# Altium footprint library SamacSys.PcbLib: 1008 footprints (part 49 of 63)
Each footprint in its own frame and in the unit in brackets; x right, y up, seen from the top. Pads: shape width x height; smd on the part's side, far side on the other; paste and mask are expansions set on the pad; w line width, h text height; cw(c..) or ccw(c..) is an arc to the next point about the centre after c.
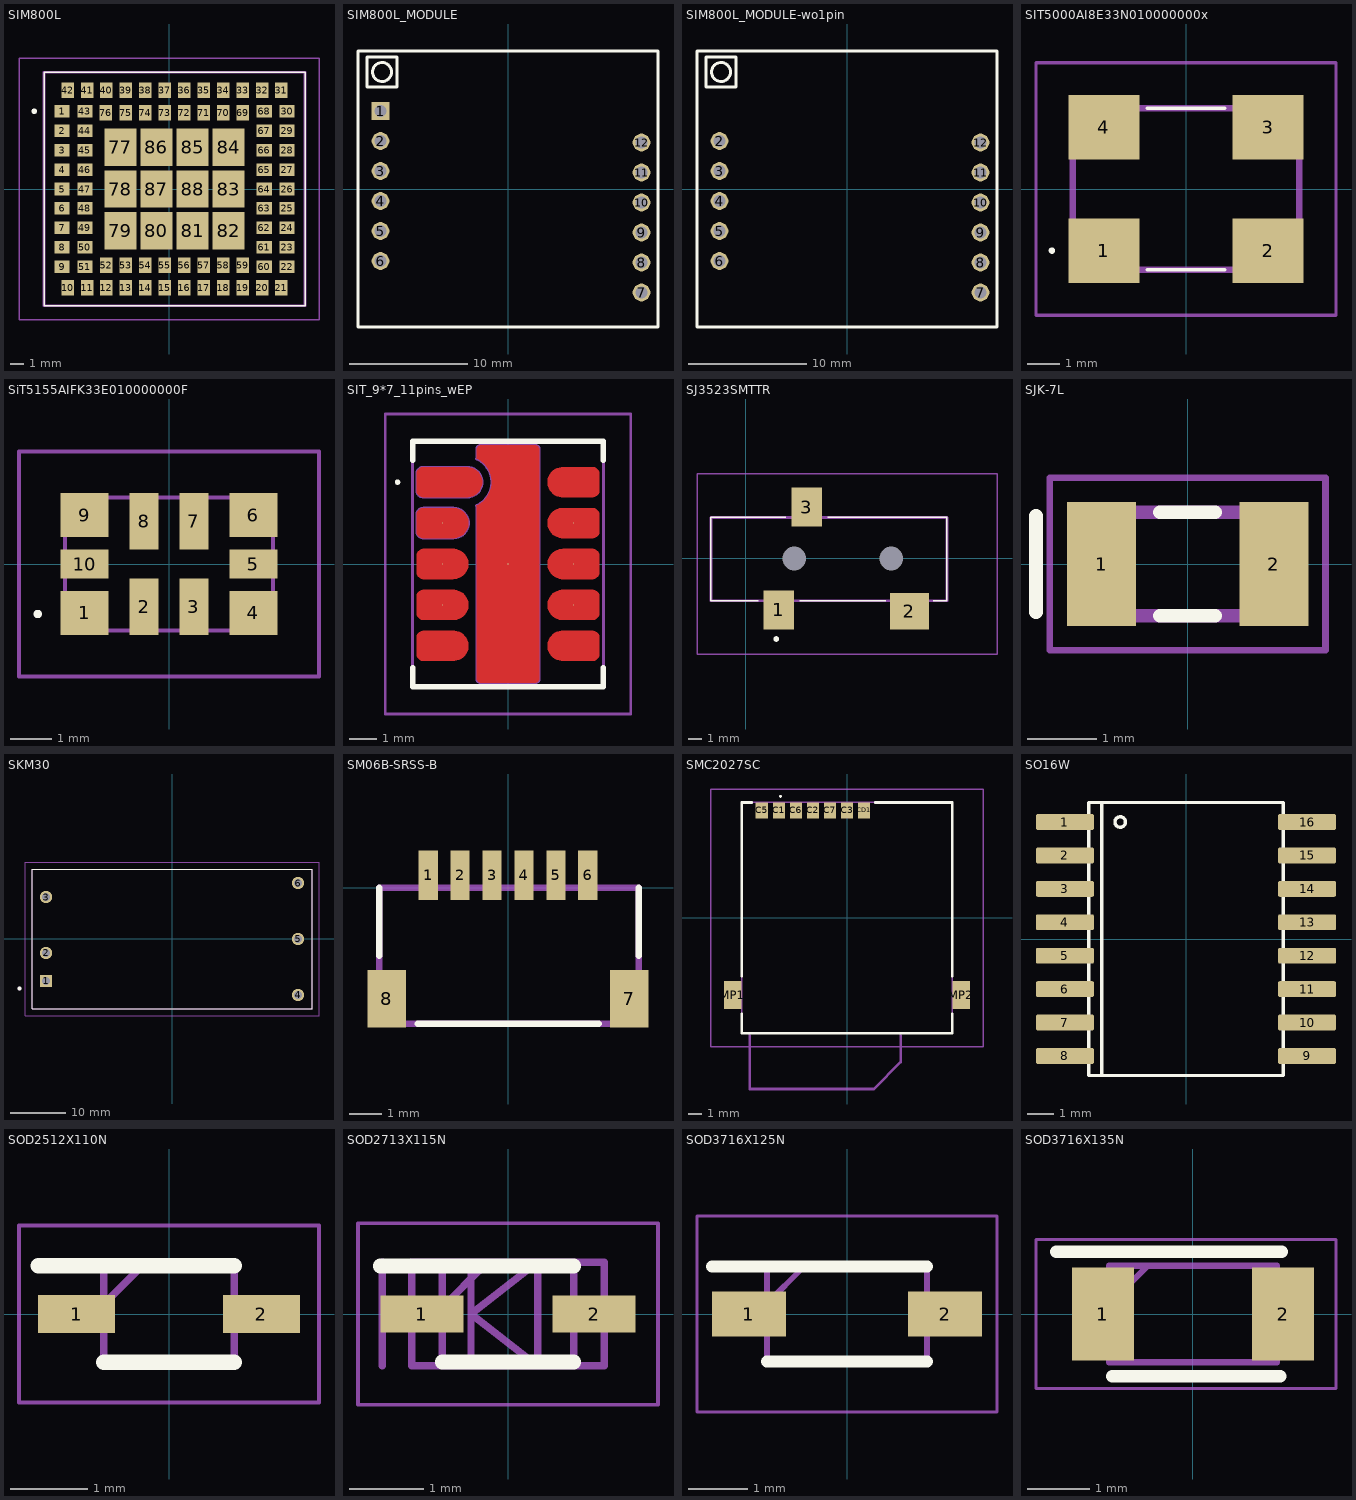
[diagram p48: the footprints below, top view; thin cyan lines are the x and y axes]

## SIM800L [mm]
pads (88):
  rect 1.1x0.9 smd: 1(-7.7,5.6) 2(-7.7,4.2) 3(-7.7,2.8) 4(-7.7,1.4) 5(-7.7,0) 6(-7.7,-1.4) 7(-7.7,-2.8) 8(-7.7,-4.2) 9(-7.7,-5.6) 22(8.5,-5.6) 23(8.5,-4.2) 24(8.5,-2.8) 25(8.5,-1.4) 26(8.5,0) 27(8.5,1.4) 28(8.5,2.8) 29(8.5,4.2) 30(8.5,5.6) 43(-6.05,5.6) 44(-6.05,4.2) 45(-6.05,2.8) 46(-6.05,1.4) 47(-6.05,0) 48(-6.05,-1.4) 49(-6.05,-2.8) 50(-6.05,-4.2) 51(-6.05,-5.6) 60(6.85,-5.6) 61(6.85,-4.2) 62(6.85,-2.8) 63(6.85,-1.4) 64(6.85,0) 65(6.85,1.4) 66(6.85,2.8) 67(6.85,4.2) 68(6.85,5.6)
  rect 0.9x1.1 smd: 10(-7.3,-7.1) 11(-5.9,-7.1) 12(-4.5,-7.1) 13(-3.1,-7.1) 14(-1.7,-7.1) 15(-0.3,-7.1) 16(1.1,-7.1) 17(2.5,-7.1) 18(3.9,-7.1) 19(5.3,-7.1) 20(6.7,-7.1) 21(8.1,-7.1) 31(8.1,7.1) 32(6.7,7.1) 33(5.3,7.1) 34(3.9,7.1) 35(2.5,7.1) 36(1.1,7.1) 37(-0.3,7.1) 38(-1.7,7.1) 39(-3.1,7.1) 40(-4.5,7.1) 41(-5.9,7.1) 42(-7.3,7.1) 52(-4.5,-5.5) 53(-3.1,-5.5) 54(-1.7,-5.5) 55(-0.3,-5.5) 56(1.1,-5.5) 57(2.5,-5.5) 58(3.9,-5.5) 59(5.3,-5.5) 69(5.3,5.5) 70(3.9,5.5) 71(2.5,5.5) 72(1.1,5.5) 73(-0.3,5.5) 74(-1.7,5.5) 75(-3.1,5.5) 76(-4.55,5.5)
  rect 2.3x2.7 smd: 77(-3.5,3) 78(-3.5,0) 79(-3.5,-3) 80(-0.9,-3) 81(1.7,-3) 82(4.3,-3) 83(4.3,0) 84(4.3,3) 85(1.7,3) 86(-0.9,3) 87(-0.9,0) 88(1.7,0)
Top Overlay:
  lines w0.1: -9,-8.4 9.8,-8.4 9.8,8.4 -9,8.4 -9,-8.4
  lines w0.2: -9.7,5.5 cw(c-9.7,5.6) -9.7,5.7 cw(c-9.7,5.6) -9.7,5.5
Assembly:
  lines w0.2: -9,-8.4 9.8,-8.4 9.8,8.4 -9,8.4 -9,-8.4
Countryard:
  lines w0.1: -10.8,-9.4 10.8,-9.4 10.8,9.4 -10.8,9.4 -10.8,-9.4
3D body "SIM800L.stp": height 2.42, standoff 0, extent -8.786,-7.896 9.014,7.904

## SIM800L_MODULE [mm]
height 10
pads (12):
  rect 1.5x1.5 hole 1: 1(-10.795,6.604)
  round 1.5 hole 1: 2(-10.795,4.064) 3(-10.795,1.524) 4(-10.795,-1.016) 5(-10.795,-3.556) 6(-10.795,-6.096) 7(11.303,-8.763) 8(11.303,-6.223) 9(11.303,-3.683) 10(11.303,-1.143) 11(11.303,1.397) 12(11.303,3.937)
Top Overlay:
  circle w0.254: c-10.668,9.906 r0.803
  lines w0.25: -12.7,-11.684 12.7,-11.684 12.7,11.684 -12.7,11.684 -12.7,-11.684
  lines w0.254: -11.938,8.636 -11.938,11.176 -9.398,11.176 -9.398,8.636 -11.938,8.636
Assembly:
  lines w0.1: -12.7,-11.684 12.7,-11.684 12.7,11.684 -12.7,11.684 -12.7,-11.684
Countryard:
  lines w0.1: -12.7,-11.684 -12.7,11.684 12.7,11.684 12.7,-11.684 -12.7,-11.684
3D body "User Library-PBS_(DS1023)_1line_connectors_h=5_0_8_5mm_step_2_54mm-1.step": height 5, standoff -3.3, extent -12.045,-7.616 -9.545,8.124
3D body "User Library-PBS_(DS1023)_1line_connectors_h=5_0_8_5mm_step_2_54mm-1.step": height 5, standoff -3.3, extent 10.053,-10.283 12.553,5.457
3D body "SIM800L v10.step": height 9.28, standoff 3.51, extent -12.5,-11.5 12.518,11.5

## SIM800L_MODULE-wo1pin [mm]
height 10
pads (11):
  round 1.5 hole 1: 2(-10.795,4.064) 3(-10.795,1.524) 4(-10.795,-1.016) 5(-10.795,-3.556) 6(-10.795,-6.096) 7(11.303,-8.763) 8(11.303,-6.223) 9(11.303,-3.683) 10(11.303,-1.143) 11(11.303,1.397) 12(11.303,3.937)
Top Overlay:
  circle w0.254: c-10.668,9.906 r0.803
  lines w0.25: -12.7,-11.684 -12.7,11.684 12.7,11.684 12.7,-11.684 -12.7,-11.684
  lines w0.254: -11.938,8.636 -9.398,8.636 -9.398,11.176 -11.938,11.176 -11.938,8.636
Assembly:
  lines w0.1: -12.7,-11.684 -12.7,11.684 12.7,11.684 12.7,-11.684 -12.7,-11.684
Countryard:
  lines w0.1: -12.7,-11.684 12.7,-11.684 12.7,11.684 -12.7,11.684 -12.7,-11.684
3D body "User Library-PBS_(DS1023)_1line_connectors_h=5_0_8_5mm_step_2_54mm (3).step": height 8.5, standoff -3, extent -12.05,-7.6 -9.55,5.6
3D body "SIM800L v10.step": height 9.28, standoff 3.51, extent -12.5,-11.5 12.518,11.5
3D body "User Library-PBS_(DS1023)_1line_connectors_h=5_0_8_5mm_step_2_54mm-1.step": height 5, standoff -3.3, extent 10.053,-10.283 12.553,5.457

## SIT5000AI8E33N010000000x [mm]
pads (4):
  rect 2.2x2 smd: 1(-2.54,-1.905) 2(2.54,-1.905) 3(2.54,1.905) 4(-2.54,1.905)
Top Overlay:
  lines w0.1: -1.2,-2.5 1.2,-2.5 ; -1.2,2.5 1,2.5 1.2,2.5 ; -4.2,-1.905 cw(c-4.15,-1.905) -4.1,-1.905 cw(c-4.15,-1.905) -4.2,-1.905
Assembly:
  lines w0.2: -3.5,-2.5 -3.5,2.5 3.5,2.5 3.5,-2.5 -3.5,-2.5
Countryard:
  lines w0.1: -4.64,-3.905 -4.64,3.905 4.64,3.905 4.64,-3.905 -4.64,-3.905
3D body "SIT5000AI-8E-33N0-10.000000x.stp": height 1.1, standoff 0, extent -3.5,-2.705 3.5,2.705

## SiT5155AIFK33E010000000F [mm]
pads (10):
  rect 1.15x1.05 smd: 1(-2.025,-1.175) 4(2.025,-1.175) 6(2.025,1.175) 9(-2.025,1.175)
  rect 0.7x1.35 smd: 2(-0.6,-1.025) 3(0.6,-1.025) 7(0.6,1.025) 8(-0.6,1.025)
  rect 1.15x0.7 smd: 5(2.025,0) 10(-2.025,0)
Top Overlay:
  lines w0.1: -3.2,-1.2 cw(c-3.15,-1.2) -3.1,-1.2 cw(c-3.15,-1.2) -3.2,-1.2
Assembly:
  lines w0.1: -2.5,-1.6 2.5,-1.6 2.5,1.6 -2.5,1.6 -2.5,-1.6
Countryard:
  lines w0.1: -3.6,-2.7 3.6,-2.7 3.6,2.7 -3.6,2.7 -3.6,-2.7
3D body "SiT5155AI-FK-33E0-10.000000F.stp": height 1.16, standoff 0, extent -2.53,-1.63 2.53,1.63

## SIT_9*7_11pins_wEP [mil]
pads (11):
  round 1 smd: 1(-84.65,118.11) 2(-94.49,59.06) 3(-94.49,0) 4(-94.49,-59.06) 5(-94.49,-118.11) 6(94.49,-118.11) 7(94.49,-59.06) 8(94.49,0) 9(94.49,59.06) 10(94.49,118.11) 11(-0.17,0)
Top Layer:
  region: 122.05,139.76 123.02,139.76 124.92,139.39 126.71,138.64 128.32,137.57 129.69,136.2 130.77,134.58 131.51,132.79 131.89,130.89 131.89,129.92 131.89,106.3 131.89,105.33 131.51,103.43 130.77,101.64 129.69,100.02 128.32,98.65 126.71,97.58 124.92,96.83 123.02,96.46 122.05,96.46 78.74,96.46 77.04,96.46 73.67,96.99 70.43,98.04 67.39,99.59 64.63,101.59 62.22,104 60.22,106.76 58.67,109.8 57.62,113.04 57.09,116.41 57.09,119.81 57.62,123.18 58.67,126.42 60.22,129.46 62.22,132.22 64.63,134.63 67.39,136.63 70.43,138.18 73.67,139.23 77.04,139.76 78.74,139.76
  region: 122.05,80.71 123.02,80.71 124.92,80.33 126.71,79.59 128.32,78.51 129.69,77.14 130.77,75.53 131.51,73.74 131.89,71.84 131.89,70.87 131.89,47.24 131.89,46.27 131.51,44.37 130.77,42.58 129.69,40.97 128.32,39.6 126.71,38.52 124.92,37.78 123.02,37.4 122.05,37.4 78.74,37.4 77.04,37.4 73.67,37.93 70.43,38.99 67.39,40.54 64.63,42.54 62.22,44.95 60.22,47.71 58.67,50.74 57.62,53.98 57.09,57.35 57.09,60.76 57.62,64.13 58.67,67.37 60.22,70.4 62.22,73.16 64.63,75.57 67.39,77.57 70.43,79.12 73.67,80.18 77.04,80.71 78.74,80.71
  region: 122.05,21.65 123.02,21.65 124.92,21.28 126.71,20.53 128.32,19.46 129.69,18.09 130.77,16.47 131.51,14.68 131.89,12.78 131.89,11.81 131.89,-11.81 131.89,-12.78 131.51,-14.68 130.77,-16.47 129.69,-18.09 128.32,-19.46 126.71,-20.53 124.92,-21.28 123.02,-21.65 122.05,-21.65 78.74,-21.65 77.04,-21.65 73.67,-21.12 70.43,-20.07 67.39,-18.52 64.63,-16.52 62.22,-14.11 60.22,-11.35 58.67,-8.31 57.62,-5.07 57.09,-1.7 57.09,1.7 57.62,5.07 58.67,8.31 60.22,11.35 62.22,14.11 64.63,16.52 67.39,18.52 70.43,20.07 73.67,21.12 77.04,21.65 78.74,21.65
  region: 122.05,-37.4 123.02,-37.4 124.92,-37.78 126.71,-38.52 128.32,-39.6 129.69,-40.97 130.77,-42.58 131.51,-44.37 131.89,-46.27 131.89,-47.24 131.89,-70.87 131.89,-71.84 131.51,-73.74 130.77,-75.53 129.69,-77.14 128.32,-78.51 126.71,-79.59 124.92,-80.33 123.02,-80.71 122.05,-80.71 78.74,-80.71 77.04,-80.71 73.67,-80.18 70.43,-79.12 67.39,-77.57 64.63,-75.57 62.22,-73.16 60.22,-70.4 58.67,-67.37 57.62,-64.13 57.09,-60.76 57.09,-57.35 57.62,-53.98 58.67,-50.74 60.22,-47.71 62.22,-44.95 64.63,-42.54 67.39,-40.54 70.43,-38.99 73.67,-37.93 77.04,-37.4 78.74,-37.4
  region: -122.05,-139.76 -123.02,-139.76 -124.92,-139.39 -126.71,-138.64 -128.32,-137.57 -129.69,-136.2 -130.77,-134.58 -131.51,-132.79 -131.89,-130.89 -131.89,-129.92 -131.89,-106.3 -131.89,-105.33 -131.51,-103.43 -130.77,-101.64 -129.69,-100.02 -128.32,-98.65 -126.71,-97.58 -124.92,-96.83 -123.02,-96.46 -122.05,-96.46 -78.74,-96.46 -77.04,-96.46 -73.67,-96.99 -70.43,-98.04 -67.39,-99.59 -64.63,-101.59 -62.22,-104 -60.22,-106.76 -58.67,-109.8 -57.62,-113.04 -57.09,-116.41 -57.09,-119.81 -57.62,-123.18 -58.67,-126.42 -60.22,-129.46 -62.22,-132.22 -64.63,-134.63 -67.39,-136.63 -70.43,-138.18 -73.67,-139.23 -77.04,-139.76 -78.74,-139.76
  region: -122.05,-80.71 -123.02,-80.71 -124.92,-80.33 -126.71,-79.59 -128.32,-78.51 -129.69,-77.14 -130.77,-75.53 -131.51,-73.74 -131.89,-71.84 -131.89,-70.87 -131.89,-47.24 -131.89,-46.27 -131.51,-44.37 -130.77,-42.58 -129.69,-40.97 -128.32,-39.6 -126.71,-38.52 -124.92,-37.78 -123.02,-37.4 -122.05,-37.4 -78.74,-37.4 -77.04,-37.4 -73.67,-37.93 -70.43,-38.99 -67.39,-40.54 -64.63,-42.54 -62.22,-44.95 -60.22,-47.71 -58.67,-50.74 -57.62,-53.98 -57.09,-57.35 -57.09,-60.76 -57.62,-64.13 -58.67,-67.37 -60.22,-70.4 -62.22,-73.16 -64.63,-75.57 -67.39,-77.57 -70.43,-79.12 -73.67,-80.18 -77.04,-80.71 -78.74,-80.71
  region: -122.05,-21.65 -123.02,-21.65 -124.92,-21.28 -126.71,-20.53 -128.32,-19.46 -129.69,-18.09 -130.77,-16.47 -131.51,-14.68 -131.89,-12.78 -131.89,-11.81 -131.89,11.81 -131.89,12.78 -131.51,14.68 -130.77,16.47 -129.69,18.09 -128.32,19.46 -126.71,20.53 -124.92,21.28 -123.02,21.65 -122.05,21.65 -78.74,21.65 -77.04,21.65 -73.67,21.12 -70.43,20.07 -67.39,18.52 -64.63,16.52 -62.22,14.11 -60.22,11.35 -58.67,8.31 -57.62,5.07 -57.09,1.7 -57.09,-1.7 -57.62,-5.07 -58.67,-8.31 -60.22,-11.35 -62.22,-14.11 -64.63,-16.52 -67.39,-18.52 -70.43,-20.07 -73.67,-21.12 -77.04,-21.65 -78.74,-21.65
  region: -122.05,96.46 -123.02,96.46 -124.92,96.83 -126.71,97.58 -128.32,98.65 -129.69,100.02 -130.77,101.64 -131.51,103.43 -131.89,105.33 -131.89,106.3 -131.89,129.92 -131.89,130.89 -131.51,132.79 -130.77,134.58 -129.69,136.2 -128.32,137.57 -126.71,138.64 -124.92,139.39 -123.02,139.76 -122.05,139.76 -59.06,139.76 -57.35,139.76 -53.98,139.23 -50.74,138.18 -47.71,136.63 -44.95,134.63 -42.54,132.22 -40.54,129.46 -38.99,126.42 -37.93,123.18 -37.4,119.81 -37.4,116.41 -37.93,113.04 -38.99,109.8 -40.54,106.76 -42.54,104 -44.95,101.59 -47.71,99.59 -50.74,98.04 -53.98,96.99 -57.35,96.46 -59.06,96.46
  region: -122.05,37.4 -123.02,37.4 -124.92,37.78 -126.71,38.52 -128.32,39.6 -129.69,40.97 -130.77,42.58 -131.51,44.37 -131.89,46.27 -131.89,47.24 -131.89,70.87 -131.89,71.84 -131.51,73.74 -130.77,75.53 -129.69,77.14 -128.32,78.51 -126.71,79.59 -124.92,80.33 -123.02,80.71 -122.05,80.71 -78.74,80.71 -77.04,80.71 -73.67,80.18 -70.43,79.12 -67.39,77.57 -64.63,75.57 -62.22,73.16 -60.22,70.4 -58.67,67.37 -57.62,64.13 -57.09,60.76 -57.09,57.35 -57.62,53.98 -58.67,50.74 -60.22,47.71 -62.22,44.95 -64.63,42.54 -67.39,40.54 -70.43,38.99 -73.67,37.93 -77.04,37.4 -78.74,37.4
  region: 122.05,-96.46 123.02,-96.46 124.92,-96.83 126.71,-97.58 128.32,-98.65 129.69,-100.02 130.77,-101.64 131.51,-103.43 131.89,-105.33 131.89,-106.3 131.89,-129.92 131.89,-130.89 131.51,-132.79 130.77,-134.58 129.69,-136.2 128.32,-137.57 126.71,-138.64 124.92,-139.39 123.02,-139.76 122.05,-139.76 78.74,-139.76 77.04,-139.76 73.67,-139.23 70.43,-138.18 67.39,-136.63 64.63,-134.63 62.22,-132.22 60.22,-129.46 58.67,-126.42 57.62,-123.18 57.09,-119.81 57.09,-116.41 57.62,-113.04 58.67,-109.8 60.22,-106.76 62.22,-104 64.63,-101.59 67.39,-99.59 70.43,-98.04 73.67,-96.99 77.04,-96.46 78.74,-96.46
  region: -45.28,-165.35 -45.28,84.65 -45.61,84.03 -43.21,85.22 -38.71,88.09 -34.67,91.57 -31.16,95.6 -28.25,100.08 -26.02,104.93 -24.5,110.05 -23.73,115.33 -23.71,120.67 -24.45,125.96 -25.94,131.08 -28.15,135.95 -31.02,140.45 -34.51,144.49 -38.54,148 -43.02,150.89 -45.41,152.1 -45.28,151.57 -45.28,165.35 -45.28,165.94 -45.05,167.08 -44.6,168.15 -43.96,169.12 -43.13,169.94 -42.17,170.59 -41.09,171.03 -39.95,171.26 -39.37,171.26 39.37,171.26 39.95,171.26 41.09,171.03 42.17,170.59 43.13,169.94 43.96,169.12 44.6,168.15 45.05,167.08 45.28,165.94 45.28,165.35 45.28,-165.35 45.28,-165.94 45.05,-167.08 44.6,-168.15 43.96,-169.12 43.13,-169.94 42.17,-170.59 41.09,-171.03 39.95,-171.26 39.37,-171.26 -39.37,-171.26 -39.95,-171.26 -41.09,-171.03 -42.17,-170.59 -43.13,-169.94 -43.96,-169.12 -44.6,-168.15 -45.05,-167.08 -45.28,-165.94
Top Overlay:
  lines w3.94: -161.42,118.11 ccw(c-159.45,118.11) -157.48,118.11 ccw(c-159.45,118.11) -161.42,118.11
  lines w7.87: -137.8,-149.61 -137.8,-177.17 137.8,-177.17 137.8,-149.61 ; -137.8,149.61 -137.8,177.17 137.8,177.17 137.8,149.61
Assembly:
  lines w3.94: -137.8,-177.17 -137.8,177.17 137.8,177.17 137.8,-177.17 -137.8,-177.17
Countryard:
  lines w3.94: -45.61,84.03 ccw(c-61.02,118.11) -45.41,152.1 ; -45.28,84.65 -45.28,-165.35 ccw(c-39.37,-165.35) -39.37,-171.26 39.37,-171.26 ccw(c39.37,-165.35) 45.28,-165.35 45.28,165.35 ccw(c39.37,165.35) 39.37,171.26 -39.37,171.26 ccw(c-39.37,165.35) -45.28,165.35 -45.28,151.57 ; -177.17,-216.54 -177.17,216.54 177.17,216.54 177.17,-216.54 -177.17,-216.54 ; -131.89,47.24 ccw(c-122.05,47.24) -122.05,37.4 -78.74,37.4 ccw(c-78.74,59.06) -78.74,80.71 -122.05,80.71 ccw(c-122.05,70.87) -131.89,70.87 -131.89,47.24 ; -131.89,106.3 ccw(c-122.05,106.3) -122.05,96.46 -59.06,96.46 ccw(c-59.06,118.11) -59.06,139.76 -122.05,139.76 ccw(c-122.05,129.92) -131.89,129.92 -131.89,106.3
3D body: height 141.73, standoff 0, extent -137.8,-177.17 137.8,177.17

## SJ3523SMTTR [mm]
pads (5):
  rect 2.2x2.8 smd: 1(2.4,-3.7) 3(4.4,3.7)
  rect 2.8x2.6 smd: 2(11.8,-3.8)
  round 0.85 hole 1.7 unplated: MH1(3.5,0) MH2(10.5,0)
Top Overlay:
  lines w0.1: 0.9,-3.05 -2.5,-3.05 -2.5,2.95 2.9,2.95 ; 3.9,-3.05 10.1,-3.05 ; 5.9,2.95 14.5,2.95 ; 13.5,-3.05 14.5,-3.05 14.5,-1.5 14.5,3
  lines w0.2: 2.1,-5.8 cw(c2.2,-5.8) 2.3,-5.8 cw(c2.2,-5.8) 2.1,-5.8
Assembly:
  lines w0.2: -2.5,-3.05 -2.5,2.95 14.5,2.95 14.5,-3.05 -2.5,-3.05
Countryard:
  lines w0.1: -3.5,-6.9 -3.5,6.1 18.1,6.1 18.1,-6.9 -3.5,-6.9
3D body "SJ-3523-SMT-TR.stp": height 5.3, standoff -1.7, extent -2.5,-4.88 14.5,4.88

## SJK-7L [mm]
pads (2):
  rect 1x1.8 smd: 1(-1.25,0) 2(1.25,0)
Top Overlay:
  lines w0.2: -2.2,-0.7 -2.2,0.7 ; -0.4,-0.75 0.4,-0.75 ; -0.4,0.75 0.4,0.75
Assembly:
  lines w0.2: -1.6,-0.75 -1.6,0.75 1.6,0.75 1.6,-0.75 -1.6,-0.75
Countryard:
  lines w0.1: -2,-1.25 -2,1.25 2,1.25 2,-1.25 -2,-1.25
3D body "FC-135_32.7680KA-A0.stp": height 0.9, standoff 0, extent -1.6,-0.75 1.6,0.75

## SKM30 [mm] "DC/DC, 30W"
height 12
pads (6):
  rect 2.25x2.25 hole 1.5: 1(-22.86,-7.62)
  round 2.25 hole 1.5: 2(-22.86,-2.54) 3(-22.86,7.62) 4(22.86,-10.16) 5(22.86,0) 6(22.86,10.16)
Top Overlay:
  circle w0.508: c-27.66,-8.99 r0.1
  lines w0.127: -25.4,-12.7 25.4,-12.7 25.4,12.7 -25.4,12.7 -25.4,-12.7
Assembly:
  circle w0.508: c-27.66,-8.99 r0.1
  lines w0.127: -25.4,-12.7 25.4,-12.7 25.4,12.7 -25.4,12.7 -25.4,-12.7
Countryard:
  lines w0.05: -26.67,-13.97 26.67,-13.97 26.67,13.97 -26.67,13.97 -26.67,-13.97
3D body: height 11.2, standoff 0, extent -25.4,-12.7 25.4,12.7

## SM06B-SRSS-B [mm]
pads (8):
  rect 0.6x1.55 smd: 1(-2.5,0.4) 2(-1.5,0.4) 3(-0.5,0.4) 4(0.5,0.4) 5(1.5,0.4) 6(2.5,0.4)
  rect 1.2x1.8 smd: 7(3.8,-3.475) 8(-3.8,-3.475)
Top Overlay:
  lines w0.2: -4.029,-2.125 -4.029,0 ; -2.827,-4.25 2.841,-4.25 ; 4.095,-2.125 4.095,0
Assembly:
  lines w0.2: -4.029,-4.25 4.095,-4.25 4.095,0 -4.029,0 -4.029,-4.25
3D body "SM06B-SRSS-TB.STEP": height 2.96, standoff 0, extent -3.975,-4.195 4.025,0.755

## SMC2027SC [mm] "SIM Card connector"
height 1.42
pads (9):
  rect 0.9x1.2 smd: C1(-5.08,8) C2(-2.54,8) C3(0,8) C5(-6.35,8) C6(-3.81,8) C7(-1.27,8) CD1(1.27,8)
  rect 1.3x2.1 smd: MP1(-8.5,-5.75) MP2(8.5,-5.75)
Top Overlay:
  lines w0.1: -5,9.05 ccw(c-4.95,9.05) -4.9,9.05 ccw(c-4.95,9.05) -5,9.05
  lines w0.2: -7.85,-7.15 -7.85,-8.6 7.85,-8.6 7.85,-7.15 ; -7.85,-4.35 -7.85,8.6 -7.1,8.6 ; 2.1,8.6 7.85,8.6 7.85,-4.35
Assembly:
  lines w0.1: -7.85,-8.6 -7.85,8.6 7.85,8.6 7.85,-8.6 -7.85,-8.6
Countryard:
  lines w0.1: -10.15,-9.6 -10.15,9.6 10.15,9.6 10.15,-9.6 -10.15,-9.6
  lines w0.2: -7.25,-8.75 -7.25,-12.75 2,-12.75 4,-10.75 4,-8.75
  text "SIM CARD EJECT" at -5.75,-11.75 h1.5
3D body "SMC-202-7SC.stp": height 1.64, standoff 0, extent -9.02,-8.6 9.02,8.6

## SO16W [mm]
pads (16):
  rrect20% 2.2x0.6 smd: 1(-4.6,4.445) 2(-4.6,3.175) 3(-4.6,1.905) 4(-4.6,0.635) 5(-4.6,-0.635) 6(-4.6,-1.905) 7(-4.6,-3.175) 8(-4.6,-4.445) 9(4.6,-4.445) 10(4.6,-3.175) 11(4.6,-1.905) 12(4.6,-0.635) 13(4.6,0.635) 14(4.6,1.905) 15(4.6,3.175) 16(4.6,4.445)
Top Overlay:
  circle w0.127: c-2.5,4.445 r0.2
  lines w0.127: -3.2,-5.19 -3.7,-5.19 -3.7,5.19 -3.2,5.19 ; -3.2,-5.19 3.7,-5.19 3.7,5.19 -3.2,5.19 ; -3.2,-5.19 -3.2,5.19
Assembly:
  region: 5.321,4.207 3.808,4.207 3.808,4.69 5.321,4.69
  region: 5.32,2.931 3.801,2.931 3.801,3.42 5.32,3.42
  region: 5.322,1.664 3.804,1.664 3.804,2.148 5.322,2.148
  region: 5.323,0.392 3.803,0.392 3.803,0.877 5.323,0.877
  region: 5.324,-0.878 3.802,-0.878 3.802,-0.393 5.324,-0.393
  region: 5.321,-2.15 3.8,-2.15 3.8,-1.661 5.321,-1.661
  region: 5.326,-3.42 3.8,-3.42 3.8,-2.936 5.326,-2.936
  region: 5.324,-4.691 3.8,-4.691 3.8,-4.204 5.324,-4.204
  region: -3.8,-4.691 -5.32,-4.691 -5.32,-4.2 -3.8,-4.2
  region: -3.801,-3.426 -5.326,-3.426 -5.326,-2.929 -3.801,-2.929
  region: -3.801,-2.152 -5.322,-2.152 -5.322,-1.659 -3.801,-1.659
  region: -3.802,-0.884 -5.324,-0.884 -5.324,-0.388 -3.802,-0.388
  region: -3.801,0.389 -5.321,0.389 -5.321,0.881 -3.801,0.881
  region: -3.801,1.659 -5.321,1.659 -5.321,2.151 -3.801,2.151
  region: -3.801,2.93 -5.32,2.93 -5.32,3.421 -3.801,3.421
  region: -3.805,4.199 -5.321,4.199 -5.321,4.695 -3.805,4.695
3D body "step_temp.STEP": height 2.64, standoff 0, extent -5.15,-6.4 5.15,6.4

## SOD2512X110N [mm]
pads (2):
  rect 1x0.5 smd: 1(-1.2,0) 2(1.2,0)
Top Overlay:
  lines w0.2: -1.7,0.625 0.85,0.625 ; -0.85,-0.625 0.85,-0.625
Assembly:
  lines w0.1: -0.85,0.125 -0.35,0.625 ; -0.85,-0.625 -0.85,0.625 0.85,0.625 0.85,-0.625 -0.85,-0.625
Countryard:
  lines w0.05: -1.95,-1.15 -1.95,1.15 1.95,1.15 1.95,-1.15 -1.95,-1.15
3D body "BAT54HT1G.stp": height 1.1, standoff 0, extent -1.25,-0.625 1.25,0.625

## SOD2713X115N [mm]
pads (2):
  rect 1.125x0.5 smd: 1(-1.162,0) 2(1.162,0)
Top Overlay:
  lines w0.2: -1.725,0.65 0.888,0.65 ; -0.888,-0.65 0.888,-0.65
Top Assembly:
  lines w0.1: -1.7,-0.7 -1.7,0.7 ; -0.5,-0.7 -0.5,0.7 ; -1.3,-0.7 1.3,-0.7 1.3,0.7 -1.3,0.7 -1.3,-0.7 ; -0.5,0 0.4,-0.7 0.4,0.7 -0.5,0
Assembly:
  lines w0.1: -0.888,0.088 -0.325,0.65 ; -0.888,-0.65 0.888,-0.65 0.888,0.65 -0.888,0.65 -0.888,-0.65
Countryard:
  lines w0.05: -2.025,-1.225 2.025,-1.225 2.025,1.225 -2.025,1.225 -2.025,-1.225
3D body "BAV19WS-E3-08.stp": height 1.15, standoff 0, extent -1.338,-0.65 1.338,0.65

## SOD3716X125N [mm]
pads (2):
  rect 1.25x0.75 smd: 1(-1.65,0) 2(1.65,0)
Top Overlay:
  lines w0.2: -2.275,0.8 1.35,0.8 ; -1.35,-0.8 1.35,-0.8
Assembly:
  lines w0.1: -1.35,0.175 -0.725,0.8 ; -1.35,-0.8 -1.35,0.8 1.35,0.8 1.35,-0.8 -1.35,-0.8
Countryard:
  lines w0.05: -2.525,-1.65 -2.525,1.65 2.525,1.65 2.525,-1.65 -2.525,-1.65
3D body "B5819W.stp": height 1.25, standoff 0, extent -1.85,-0.8 1.85,0.8

## SOD3716X135N [mm]
pads (2):
  rect 1x1.5 smd: 1(-1.45,0) 2(1.45,0)
Top Overlay:
  lines w0.2: -2.2,1 1.425,1 ; -1.3,-1 1.4,-1
Assembly:
  lines w0.1: -1.35,0.15 -0.725,0.775 ; -1.35,-0.775 1.35,-0.775 1.35,0.775 -1.35,0.775 -1.35,-0.775
Countryard:
  lines w0.05: -2.525,-1.2 2.3,-1.2 2.3,1.2 -2.525,1.2 -2.525,-1.2
3D body "User Library-SOD-123FL CASE 498.step": height 0.95, standoff 0, extent -1.8,-0.825 1.8,0.825